# Altium footprint library PCIexpress_x4_full.PcbLib: 1 footprints
Each footprint in its own frame and in the unit in brackets; x right, y up, seen from the top. Pads: shape width x height; smd on the part's side, far side on the other; paste and mask are expansions set on the pad; w line width, h text height; cw(c..) or ccw(c..) is an arc to the next point about the centre after c.
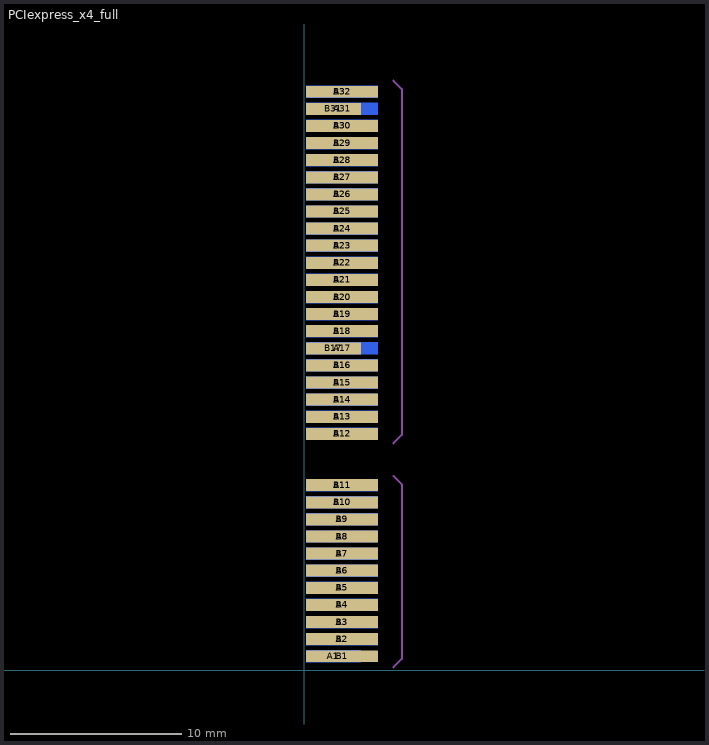
[diagram p0: the footprint, top view; thin cyan lines are the x and y axes]

## PCIexpress_x4_full [mm]
pads (64):
  rect 3.2x0.7 smd far side paste-3.2 mask-3.2: A1(1.704,0.831)
  rect 4.2x0.7 smd far side paste-4.2 mask-4.2: A2(2.204,1.831) A3(2.204,2.831) A4(2.204,3.831) A5(2.204,4.831) A6(2.204,5.831) A7(2.204,6.831) A8(2.204,7.831) A9(2.204,8.831) A10(2.204,9.831) A11(2.204,10.831) A12(2.204,13.831) A13(2.204,14.831) A14(2.204,15.831) A15(2.204,16.831) A16(2.204,17.831) A17(2.204,18.831) A18(2.204,19.831) A19(2.204,20.831) A20(2.204,21.831) A21(2.204,22.831) A22(2.204,23.831) A23(2.204,24.831) A24(2.204,25.831) A25(2.204,26.831) A26(2.204,27.831) A27(2.204,28.831) A28(2.204,29.831) A29(2.204,30.831) A30(2.204,31.831) A31(2.204,32.831) A32(2.204,33.831)
  rect 4.2x0.7 smd paste-4.2 mask-4.2: B1(2.204,0.831) B2(2.204,1.831) B3(2.204,2.831) B4(2.204,3.831) B5(2.204,4.831) B6(2.204,5.831) B7(2.204,6.831) B8(2.204,7.831) B9(2.204,8.831) B10(2.204,9.831) B11(2.204,10.831) B12(2.204,13.831) B13(2.204,14.831) B14(2.204,15.831) B15(2.204,16.831) B16(2.204,17.831) B18(2.204,19.831) B19(2.204,20.831) B20(2.204,21.831) B21(2.204,22.831) B22(2.204,23.831) B23(2.204,24.831) B24(2.204,25.831) B25(2.204,26.831) B26(2.204,27.831) B27(2.204,28.831) B28(2.204,29.831) B29(2.204,30.831) B30(2.204,31.831) B32(2.204,33.831)
  rect 3.2x0.7 smd paste-3.2 mask-3.2: B17(1.704,18.831) B31(1.704,32.831)
Top Solder:
  region: 5.704,34.581 5.704,0.081 0.204,0.081 0.204,34.581
Bottom Solder:
  region: 5.704,34.581 5.704,0.081 0.204,0.081 0.204,34.581
Mechanical 2:
  lines w0.12: 5.204,0.181 5.704,0.681 5.704,10.881 5.204,11.381 ; 5.204,13.281 5.704,13.781 5.704,33.981 5.204,34.481